# Altium footprint library Active-Relay.PcbLib: 49 footprints (part 4 of 4)
Each footprint in its own frame and in the unit in brackets; x right, y up, seen from the top. Pads: shape width x height; smd on the part's side, far side on the other; paste and mask are expansions set on the pad; w line width, h text height; cw(c..) or ccw(c..) is an arc to the next point about the centre after c.
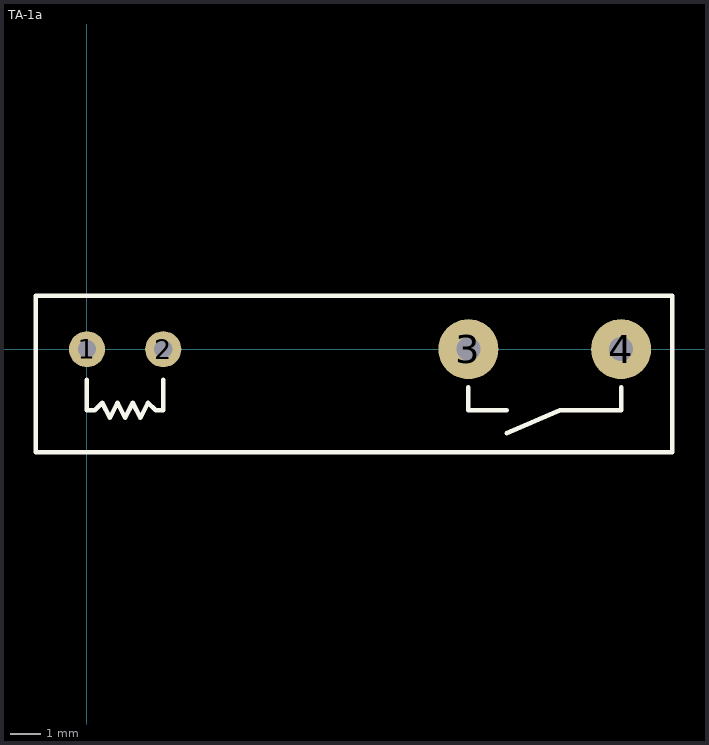
[diagram p3: the footprint, top view; thin cyan lines are the x and y axes]

## TA-1a [mm] "微功耗超薄继电器21mm*5mm*12.5mm(长*宽*高)"
pads (4):
  round 1.2 hole 0.6: 1(0,0) 2(2.54,0)
  round 2 hole 0.8: 3(12.7,0) 4(17.78,0)
Top Overlay:
  lines w0.152: 0,-1.016 0,-2.032 0.254,-2.032 0.508,-1.778 0.762,-2.286 1.016,-1.778 1.27,-2.286 1.524,-1.778 1.778,-2.286 2.032,-1.778 2.286,-2.032 2.54,-2.032 2.54,-1.016 ; 12.7,-1.27 12.7,-2.032 13.97,-2.032 ; 13.97,-2.794 15.748,-2.032 17.78,-2.032 17.78,-1.27 ; -1.702,-3.429 19.482,-3.429 19.482,1.778 -1.702,1.778 -1.702,-3.429
3D body "TA-1a-.STEP": height 12.55, standoff -3.45, extent -1.696,-3.262 19.304,1.738